# Altium footprint library aksima_footprint.PcbLib: 56 footprints (part 3 of 4)
Each footprint in its own frame and in the unit in brackets; x right, y up, seen from the top. Pads: shape width x height; smd on the part's side, far side on the other; paste and mask are expansions set on the pad; w line width, h text height; cw(c..) or ccw(c..) is an arc to the next point about the centre after c.
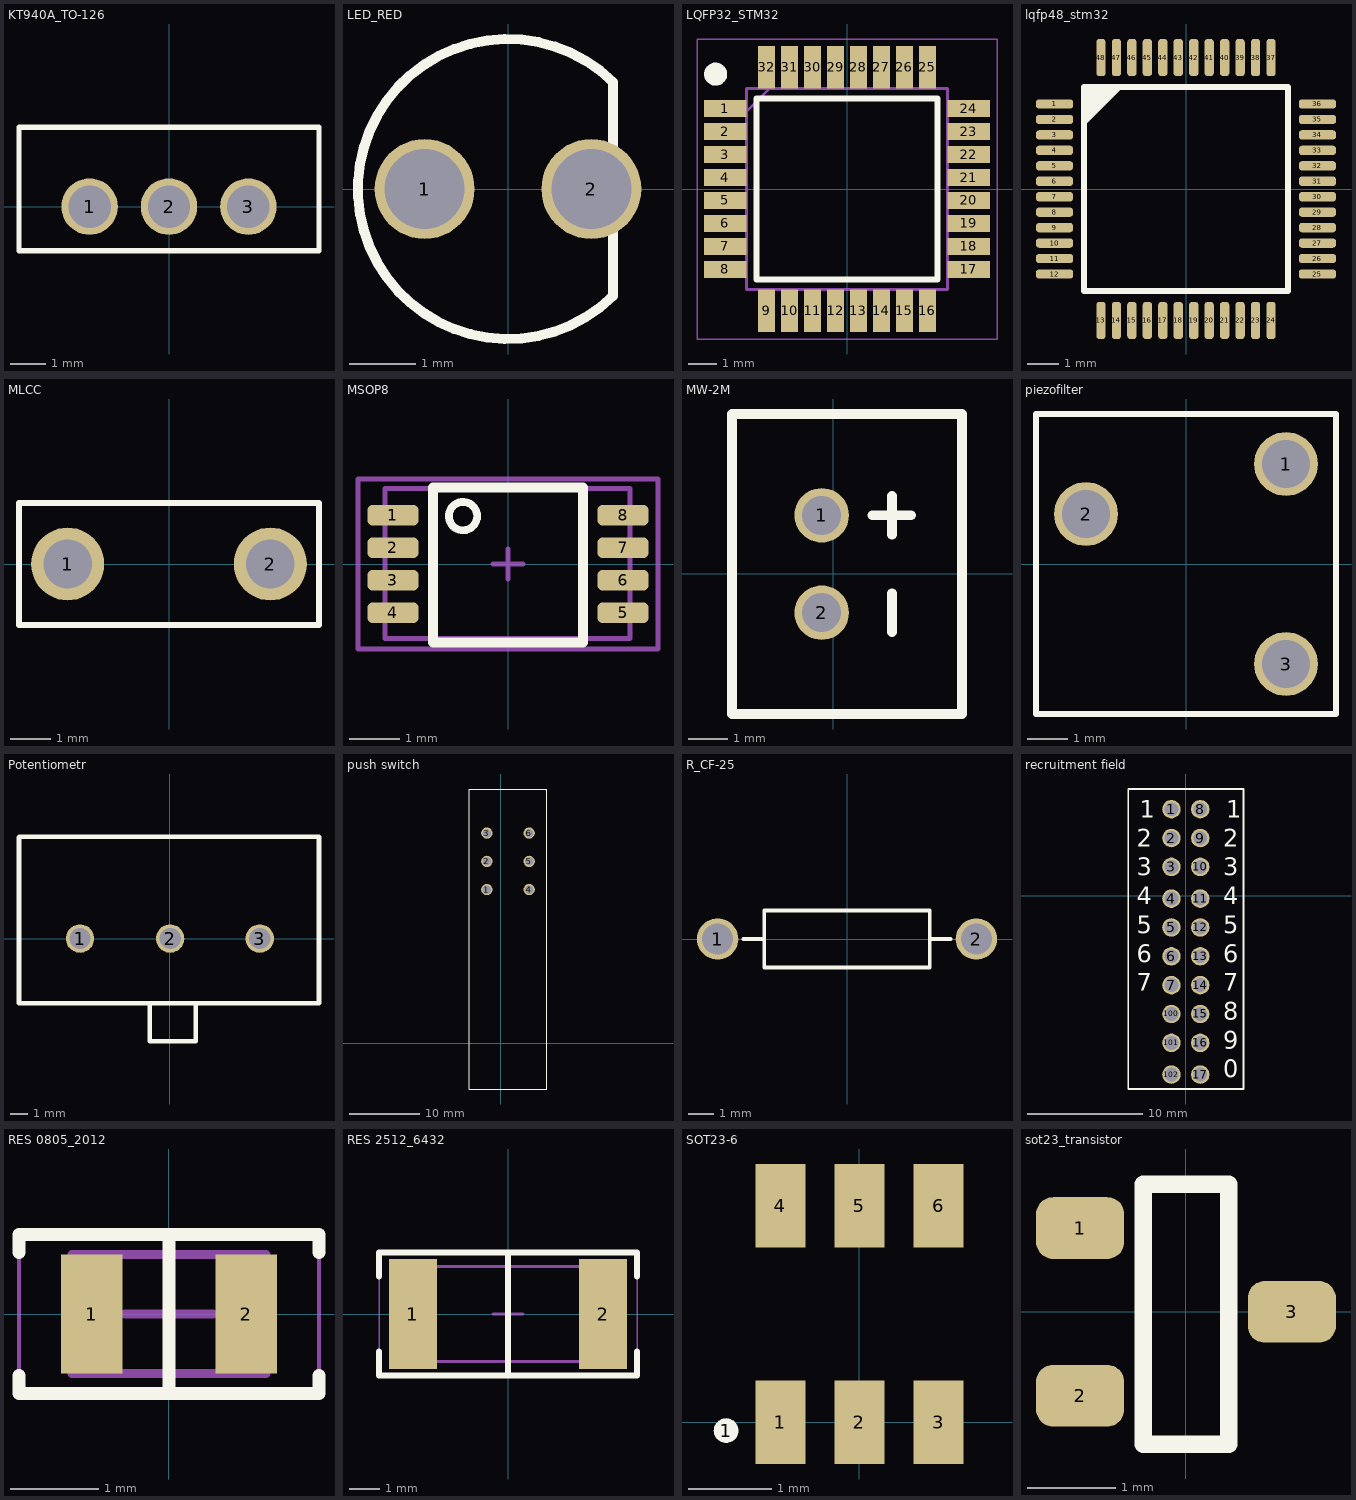
[diagram p2: the footprints below, top view; thin cyan lines are the x and y axes]

## KT940A_TO-126 [mm] "Bipolar transistor, KT940A, TO-126 package"
pads (3):
  round 1.6 hole 1.2: 1(-2.25,0) 2(0,0) 3(2.25,0)
Top Overlay:
  lines w0.15: -4.25,-1.25 -4.25,2.25 4.25,2.25 4.25,-1.25 -4.25,-1.25
3D body "TO-126.step": height 13, standoff -14.1, extent -4,-1.1 4,2.15

## LED_RED [mm] "LED RED footprint"
pads (2):
  round 1.5 hole 1.2: 1(-1.25,0) 2(1.25,0)
Top Overlay:
  lines w0.15: 1.578,-1.604 cw(c0,0) 1.579,1.603 1.579,-1.603 1.578,-1.604
3D body "LED 3mm RED.STEP": height 7.5, standoff -23, extent -1.6,-1.599 1.6,1.599

## LQFP32_STM32 [mm] "LQFP32 STM32 footprint"
pads (32):
  rect 1.475x0.6 smd: 1(-4.238,2.8) 2(-4.238,2) 3(-4.238,1.2) 4(-4.238,0.4) 5(-4.238,-0.4) 6(-4.238,-1.2) 7(-4.238,-2) 8(-4.238,-2.8) 17(4.238,-2.8) 18(4.238,-2) 19(4.238,-1.2) 20(4.238,-0.4) 21(4.238,0.4) 22(4.238,1.2) 23(4.238,2) 24(4.238,2.8)
  rect 0.6x1.475 smd: 9(-2.8,-4.238) 10(-2,-4.238) 11(-1.2,-4.238) 12(-0.4,-4.238) 13(0.4,-4.238) 14(1.2,-4.238) 15(2,-4.238) 16(2.8,-4.238) 25(2.8,4.238) 26(2,4.238) 27(1.2,4.238) 28(0.4,4.238) 29(-0.4,4.238) 30(-1.2,4.238) 31(-2,4.238) 32(-2.8,4.238)
Top Overlay:
  circle w0.4: c-4.575,4 r0.2
  lines w0.2: -3.15,-3.15 -3.15,3.15 3.15,3.15 3.15,-3.15 -3.15,-3.15
Mechanical 15:
  lines w0.1: -3.5,2.7 -2.7,3.5 ; -3.5,-3.5 -3.5,3.5 3.5,3.5 3.5,-3.5 -3.5,-3.5
Mechanical 20:
  lines w0.05: -5.225,-5.225 -5.225,5.225 5.225,5.225 5.225,-5.225 -5.225,-5.225
3D body "STM32_LQFP32.stp": height 1.4, standoff -0.1, extent -4.518,-4.484 4.5,4.284

## lqfp48_stm32 [mm] "lqfp48 stm32 footprint"
pads (48):
  rrect65% 1.2x0.3 smd: 1(-4.25,2.75) 2(-4.25,2.25) 3(-4.25,1.75) 4(-4.25,1.25) 5(-4.25,0.75) 6(-4.25,0.25) 7(-4.25,-0.25) 8(-4.25,-0.75) 9(-4.25,-1.25) 10(-4.25,-1.75) 11(-4.25,-2.25) 12(-4.25,-2.75) 25(4.25,-2.75) 26(4.25,-2.25) 27(4.25,-1.75) 28(4.25,-1.25) 29(4.25,-0.75) 30(4.25,-0.25) 31(4.25,0.25) 32(4.25,0.75) 33(4.25,1.25) 34(4.25,1.75) 35(4.25,2.25) 36(4.25,2.75)
  rrect65% 0.3x1.2 smd: 13(-2.75,-4.25) 14(-2.25,-4.25) 15(-1.75,-4.25) 16(-1.25,-4.25) 17(-0.75,-4.25) 18(-0.25,-4.25) 19(0.25,-4.25) 20(0.75,-4.25) 21(1.25,-4.25) 22(1.75,-4.25) 23(2.25,-4.25) 24(2.75,-4.25) 37(2.75,4.25) 38(2.25,4.25) 39(1.75,4.25) 40(1.25,4.25) 41(0.75,4.25) 42(0.25,4.25) 43(-0.25,4.25) 44(-0.75,4.25) 45(-1.25,4.25) 46(-1.75,4.25) 47(-2.25,4.25) 48(-2.75,4.25)
Top Overlay:
  region: -3.25,3.25 -2.084,3.25 -3.25,2.084
  lines w0.2: -3.3,-3.3 -3.3,3.3 3.3,3.3 3.3,-3.3 -3.3,-3.3
  text "." at -4.572,3.356 h4.5
3D body "LQFP-48.STEP": height 1.59, standoff -0.01, extent -4.5,-4.5 4.5,4.5

## MLCC [mm] "Multilayer ceramic capacitor"
pads (2):
  round 1.8 hole 1.2: 1(-2.5,0) 2(2.5,0)
Top Overlay:
  lines w0.15: -3.7,-1.5 -3.7,1.5 3.7,1.5 3.7,-1.5 -3.7,-1.5
3D body "330pF MLCC Ceramic Capacitor.SLDPRT": height 7.5, standoff -7, extent -2.788,-1.251 2.788,1.251

## MSOP8 [mm] "8-lead mini small-outline IC"
pads (8):
  rrect50% 1.02x0.41 smd: 1(-2.3,0.975) 2(-2.3,0.325) 3(-2.3,-0.325) 4(-2.3,-0.975) 5(2.3,-0.975) 6(2.3,-0.325) 7(2.3,0.325) 8(2.3,0.975)
Top Overlay:
  circle w0.154: c-0.9,0.958 r0.283
  lines w0.2: -1.5,-1.565 -1.5,1.535 1.5,1.535 1.5,-1.565 -1.5,-1.565
Mechanical 1:
  text ".Designator" at -1.1,-0.5 h1
Mechanical 13:
  lines w0.102: -2.464,-1.49 -2.464,1.51 2.436,1.51 2.436,-1.49 -2.464,-1.49
Mechanical 15:
  lines w0.102: -0.3,0 0.3,0 ; 0,-0.3 0,0.3 ; -3,-1.7 -3,1.7 3,1.7 3,-1.7 -3,-1.7
3D body "MSOP-8.step": height 1.15, standoff 0, extent -2.464,-1.49 2.436,1.51

## MW-2M [mm] "MW-2M two-position connector"
pads (2):
  round 1.4 hole 1: 1(-0.3,1.5) 2(-0.3,-1)
Top Overlay:
  lines w0.254: 1,1.5 2,1.5 ; 1.5,-1.5 1.5,-0.5 ; 1.5,1 1.5,2 ; -2.6,-3.6 3.3,-3.6 3.3,4.1 -2.6,4.1 -2.6,-3.6
3D body "2 Pin RMC Header.step": height 7, standoff -2.87, extent -2.5,-3.55 3.2,3.95

## piezofilter [mm] "Piezoelectric filter"
pads (3):
  round 1.6 hole 1.2: 1(2.5,2.5) 2(-2.5,1.25) 3(2.5,-2.5)
Top Overlay:
  lines w0.15: -3.75,-3.75 3.75,-3.75 3.75,3.75 -3.75,3.75 -3.75,0.25 -3.75,-3.75
3D body "Filter.stp": height 10, standoff -2.3, extent -3.6,-3.75 3.6,3.75

## Potentiometr [mm] "Potentiometer, original library value 50 kOhm"
pads (3):
  round 1.6 hole 1.2: 1(-5.062,0) 2(0.013,0) 3(5.063,0)
Top Overlay:
  lines w0.254: -1.125,-3.65 -1.125,-5.775 1.45,-5.775 1.45,-3.65 ; -8.5,-3.65 8.4,-3.65 8.4,5.725 -8.475,5.725 -8.5,5.7 -8.5,-3.65
3D body "POT10K.step": height 22.5, standoff -3, extent -8.486,-18.45 8.511,5.75

## push switch [mm] "push switch footprint"
pads (6):
  round 1.6 hole 1.2 unplated: 1(-2,21.75) 2(-2,25.75) 3(-2,29.75) 4(4,21.75) 5(4,25.75) 6(4,29.75)
Top Overlay:
  lines w0.15: -4.5,-6.5 6.5,-6.5 6.5,36 -4.5,36 -4.5,-6.5
3D body "2 - -2.stp": height 12.5, standoff -3, extent -4,-6 6,35.5

## R_CF-25 [mm] "Axial resistor, CF-25 series"
pads (2):
  round 1.6 hole 1.2: 1(-5,0) 2(5,0)
Top Overlay:
  lines w0.15: -4,0 -3.2,0 ; 3.2,0 4,0 ; -3.2,-1.1 0,-1.1 3.2,-1.1 3.2,1.1 -3.2,1.1 -3.2,-1.1
3D body "2.7R 0.4.STEP": height 2.93, standoff -2.54, extent -5.47,-1.156 5.3,1.156

## recruitment field [mm] "Prototyping pad field"
pads (20):
  round 1.6 hole 1.2 unplated: 1(-1.25,7.5) 2(-1.25,5) 3(-1.25,2.5) 4(-1.25,-0.25) 5(-1.25,-2.75) 6(-1.25,-5.25) 7(-1.25,-7.75) 8(1.25,7.5) 9(1.25,5) 10(1.25,2.5) 11(1.25,-0.25) 12(1.25,-2.75) 13(1.25,-5.25) 14(1.25,-7.75) 15(1.25,-10.25) 16(1.25,-12.75) 17(1.25,-15.5) 100(-1.25,-10.25) 101(-1.25,-12.75) 102(-1.25,-15.5)
Top Overlay:
  lines w0.15: -5,-16.75 5,-16.75 5,9.25 -5,9.25 -5,-16.75
  text "1" at -3.996,6.754 h1.52
  text "2" at -4.246,4.254 h1.52
  text "3" at -4.246,1.754 h1.52
  text "4" at -4.246,-0.746 h1.52
  text "5" at -4.246,-3.246 h1.52
  text "6" at -4.246,-5.746 h1.52
  text "7" at -4.246,-8.246 h1.52
  text "1" at 3.504,6.754 h1.52
  text "2" at 3.254,4.254 h1.52
  text "3" at 3.254,1.754 h1.52
  text "4" at 3.254,-0.746 h1.52
  text "5" at 3.254,-3.246 h1.52
  text "6" at 3.254,-5.746 h1.52
  text "7" at 3.254,-8.246 h1.52
  text "8" at 3.254,-10.746 h1.52
  text "9" at 3.254,-13.246 h1.52
  text "0" at 3.254,-15.746 h1.52
3D body "PLD-20.step": height 8.6, standoff -3, extent -2.54,-16.65 2.54,8.75

## RES 0805_2012 [mm] "Surface-mount resistor, 0805 (2012 metric)"
height 0.7
pads (2):
  rect 0.7x1.35 smd: 1(-0.875,0) 2(0.875,0)
Top Overlay:
  lines w0.15: -1.7,-0.7 -1.7,-0.9 1.7,-0.9 1.7,-0.7 ; -1.7,0.7 -1.7,0.9 1.7,0.9 1.7,0.7 ; 0,-0.9 0,0.9
Mechanical 13:
  lines w0.1: -1.1,-0.675 -1.1,0.675 1.1,0.675 1.1,-0.675 -1.1,-0.675
Mechanical 15:
  lines w0.05: -1.7,-0.95 -1.7,0.95 1.7,0.95 1.7,-0.95 -1.7,-0.95
  lines w0.1: -0.5,0 0.5,0 ; 0,-0.5 0,0.5
3D body "0805 resistor.STEP": height 0.6, standoff 0, extent -1,-0.625 1,0.625

## RES 2512_6432 [mm] "Surface-mount resistor, 2512 (6432 metric)"
height 0.6
pads (2):
  rect 1.6x3.65 smd: 1(-3.175,0) 2(3.175,0)
Top Overlay:
  lines w0.2: -4.3,-1.25 -4.3,-2.05 4.3,-2.05 4.3,-1.25 ; -4.3,1.25 -4.3,2.05 4.3,2.05 4.3,1.25 ; 0,-2.05 0,2.05
Mechanical 13:
  lines w0.1: -3.149,-1.575 -3.149,1.575 3.15,1.575 3.15,1.225 3.15,-1.575 -3.149,-1.575
Mechanical 15:
  lines w0.05: -4.3,-2.1 -4.3,2.1 4.3,2.1 4.3,-2.1 -4.3,-2.1
  lines w0.1: -0.5,0 0.5,0 ; 0,-0.5 0,0.5
3D body "RES - 2512.step": height 0.7, standoff 0, extent -3.15,-1.575 3.15,1.575

## SOT23-6 [mm] "SOT143-4 per SP0503BAHTG (WRONG PIN ORDER)"
pads (7):
  round 0.3 on Top Overlay: 1(-1.6,-0.1)
  rect 0.6x1 smd: 1(-0.95,0) 2(0,0) 3(0.95,0) 4(-0.95,2.6) 5(0,2.6) 6(0.95,2.6)
3D body "SOT236.step": height 1, standoff 0, extent -1.46,0.13 1.46,2.47

## sot23_transistor [mm] "Surface-mount transistor, SOT-23"
pads (3):
  rrect55% 1x0.7 smd: 1(-1.2,0.95) 2(-1.2,-0.95) 3(1.2,0)
Top Overlay:
  lines w0.2: -0.483,-1.499 -0.483,1.448 0.483,1.448 0.483,-1.499 -0.483,-1.499
  text "." at -2.134,1.502 h4.5
3D body "SOT23-3.STEP": height 1.29, standoff -0.01, extent -1.4,-1.45 1.4,1.45